# Altium footprint library CustomCase.PcbLib: 411 footprints (part 13 of 26)
Each footprint in its own frame and in the unit in brackets; x right, y up, seen from the top. Pads: shape width x height; smd on the part's side, far side on the other; paste and mask are expansions set on the pad; w line width, h text height; cw(c..) or ccw(c..) is an arc to the next point about the centre after c.
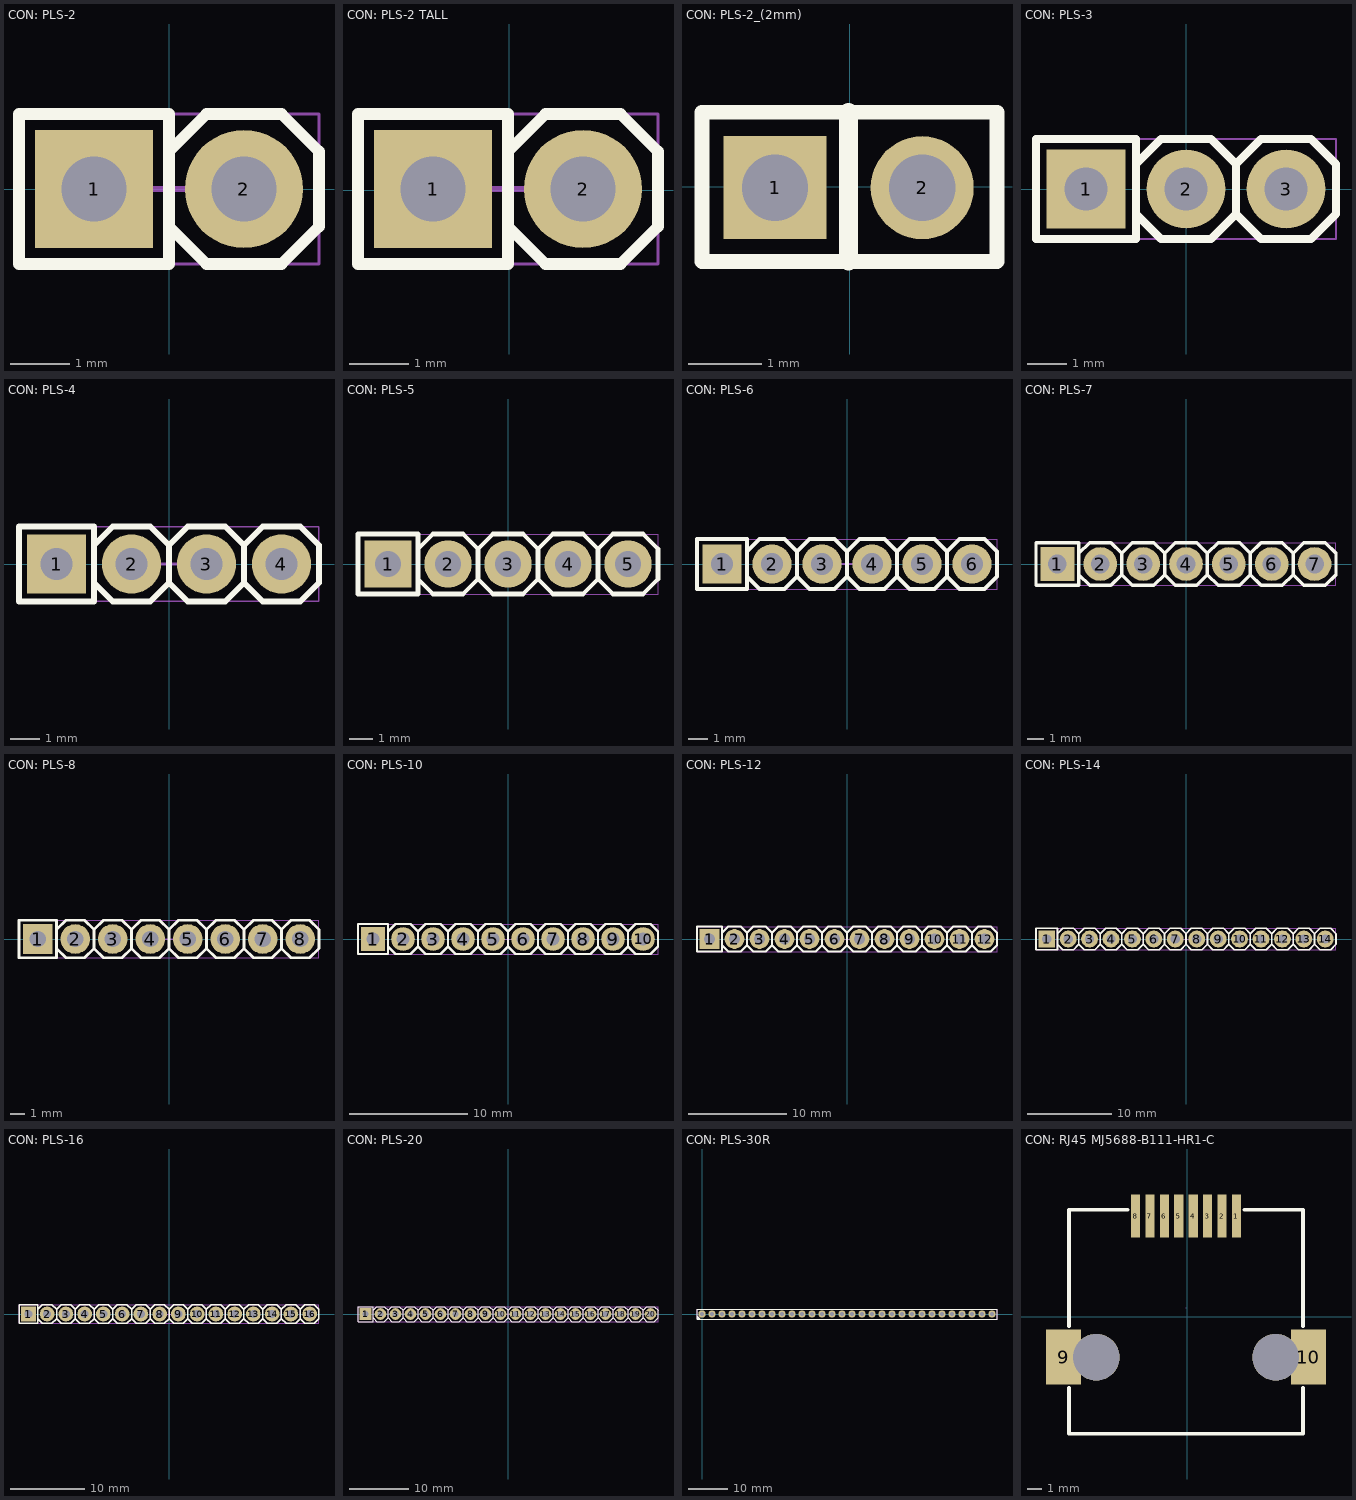
[diagram p12: the footprints below, top view; thin cyan lines are the x and y axes]

## CON: PLS-2 [mm]
height 10
pads (2):
  rect 2x2 hole 1.1: 1(-1.27,0)
  round 2 hole 1.1: 2(1.27,0)
Top Overlay:
  lines w0.2: 0,-0.635 0.635,-1.27 1.905,-1.27 2.54,-0.635 2.54,0.635 1.905,1.27 0.635,1.27 0,0.635 ; -2.54,-1.27 -2.54,1.27 0,1.27 0,-1.27 -2.54,-1.27
Top Assy:
  lines w0.1: 0,-0.635 0.635,-1.27 1.905,-1.27 2.54,-0.635 2.54,0.635 1.905,1.27 0.635,1.27 0,0.635 ; -2.54,-1.27 0,-1.27 0,1.27 -2.54,1.27 -2.54,-1.27
Size Area:
  lines w0.05: -2.54,-1.27 2.54,-1.27 2.54,1.27 -2.54,1.27 -2.54,-1.27
  lines w0.1: -0.5,0 0.5,0 ; 0,-0.5 0,0.5
3D body "PLS-2.STEP": height 8.54, standoff -3, extent -2.573,-1.284 2.507,1.256

## CON: PLS-2 TALL [mm]
pads (2):
  rect 2x2 hole 1.1: 1(-1.295,0.025)
  round 2 hole 1.1: 2(1.245,0.025)
Top Overlay:
  lines w0.2: -0.025,-0.61 0.61,-1.245 1.88,-1.245 2.515,-0.61 2.515,0.66 1.88,1.295 0.61,1.295 -0.025,0.66 ; -2.565,-1.245 -0.025,-1.245 -0.025,1.295 -2.565,1.295 -2.565,-1.245
Top Assy:
  lines w0.1: -0.025,-0.61 0.61,-1.245 1.88,-1.245 2.515,-0.61 2.515,0.66 1.88,1.295 0.61,1.295 -0.025,0.66 ; -2.565,-1.245 -2.565,1.295 -0.025,1.295 -0.025,-1.245 -2.565,-1.245
Size Area:
  lines w0.05: -2.565,-1.245 -2.565,1.295 2.515,1.295 2.515,-1.245 -2.565,-1.245
  lines w0.1: -0.525,0.025 0.475,0.025 ; -0.025,-0.475 -0.025,0.525
3D body "PLS2_TALL.stp": height 16.6, standoff -2.8, extent -2.58,-1.245 2.5,1.295

## CON: PLS-2_(2mm) [mm]
pads (2):
  rect 1.4x1.4 hole 0.9 paste-2539.97 mask+0.051: 1(-1.014,-0.015)
  round 1.4 hole 0.9 paste-2539.97 mask+0.051: 2(0.986,-0.015)
Top Overlay:
  lines w0.203: -2.004,-1.015 -2.004,1.011 2.002,1.011 2.002,-1.015 -2.004,-1.015
  lines w0.254: -0.016,-1.015 -0.016,1.011
Size Area:
  region: -1.264,0.235 -0.764,0.235 -0.764,-0.265 -1.264,-0.265
  region: 0.736,0.235 1.236,0.235 1.236,-0.265 0.736,-0.265
  region: -1.954,-1.015 -1.954,-0.99 -1.989,-0.955 -2.039,-0.955 -2.074,-0.99 -2.074,-1.015 -2.074,-1.039 -2.039,-1.075 -1.989,-1.075 -1.954,-1.039
  lines w0.051: -2.014,-1.015 1.986,-1.015 1.986,0.985 -2.014,0.985 -2.014,-1.015
3D body "1982835.stp": height 5.51, standoff -2.69, extent -2.016,-1.015 1.984,0.967
3D body: height 8, standoff -3, extent 2.725,-0.015 2.725,-0.015

## CON: PLS-3 [mm]
height 10
pads (3):
  rect 2x2 hole 1.1: 1(-2.54,0)
  round 2 hole 1.1: 2(0,0) 3(2.54,0)
Top Overlay:
  lines w0.2: -1.27,-0.635 -0.635,-1.27 0.635,-1.27 1.27,-0.635 ; -1.27,0.635 -0.635,1.27 0.635,1.27 1.27,0.635 ; 1.27,-0.635 1.905,-1.27 3.175,-1.27 3.81,-0.635 3.81,0.635 3.175,1.27 1.905,1.27 1.27,0.635 ; 1.27,-0.635 1.27,0.635 ; -3.81,-1.27 -1.27,-1.27 -1.27,1.27 -3.81,1.27 -3.81,-1.27
Top Assy:
  lines w0.1: -1.27,-0.635 -0.635,-1.27 0.635,-1.27 1.27,-0.635 ; -1.27,0.635 -0.635,1.27 0.635,1.27 1.27,0.635 ; 1.27,-0.635 1.27,0.635 ; 1.27,-0.635 1.905,-1.27 3.175,-1.27 3.81,-0.635 3.81,0.635 3.175,1.27 1.905,1.27 1.27,0.635 ; -3.81,-1.27 -3.81,1.27 -1.27,1.27 -1.27,-1.27 -3.81,-1.27
Size Area:
  lines w0.05: -3.81,-1.27 -3.81,1.27 3.81,1.27 3.81,-1.27 -3.81,-1.27
  lines w0.1: -0.5,0 0.5,0 ; 0,-0.5 0,0.5
3D body "PLS-3.STEP": height 8.54, standoff -3, extent -3.81,-1.27 3.81,1.27

## CON: PLS-4 [mm] "PLS-40 4 pin header"
height 10
pads (4):
  rect 2x2 hole 1.1: 1(-3.81,0)
  round 2 hole 1.1: 2(-1.27,0) 3(1.27,0) 4(3.81,0)
Top Overlay:
  lines w0.2: -2.54,-0.635 -1.905,-1.27 -0.635,-1.27 0,-0.635 ; -2.54,0.635 -1.905,1.27 -0.635,1.27 0,0.635 ; 0,-0.635 0,0.635 ; 0,-0.635 0.635,-1.27 1.905,-1.27 2.54,-0.635 ; 0,0.635 0.635,1.27 1.905,1.27 2.54,0.635 ; 2.54,-0.635 2.54,0.635 ; 2.54,-0.635 3.175,-1.27 4.445,-1.27 5.08,-0.635 5.08,0.635 4.445,1.27 3.175,1.27 2.54,0.635 ; -5.08,-1.27 -5.08,1.27 -2.54,1.27 -2.54,-1.27 -5.08,-1.27
Top Assy:
  lines w0.1: -2.54,-0.635 -1.905,-1.27 -0.635,-1.27 0,-0.635 ; -2.54,0.635 -1.905,1.27 -0.635,1.27 0,0.635 ; 0,-0.635 0.635,-1.27 1.905,-1.27 2.54,-0.635 ; 0,-0.635 0,0.635 ; 0,0.635 0.635,1.27 1.905,1.27 2.54,0.635 ; 2.54,-0.635 3.175,-1.27 4.445,-1.27 5.08,-0.635 5.08,0.635 4.445,1.27 3.175,1.27 2.54,0.635 ; 2.54,-0.635 2.54,0.635 ; -5.08,-1.27 -2.54,-1.27 -2.54,1.27 -5.08,1.27 -5.08,-1.27
Size Area:
  lines w0.05: -5.08,-1.27 5.08,-1.27 5.08,1.27 -5.08,1.27 -5.08,-1.27
  lines w0.1: -0.5,0 0.5,0 ; 0,-0.5 0,0.5
3D body "PLS-4.STEP": height 8.54, standoff -3, extent -5.08,-1.27 5.08,1.27

## CON: PLS-5 [mm]
height 10
pads (5):
  rect 2x2 hole 1.1: 1(-5.08,0)
  round 2 hole 1.1: 2(-2.54,0) 3(0,0) 4(2.54,0) 5(5.08,0)
Top Overlay:
  lines w0.2: -3.81,-0.635 -3.175,-1.27 -1.905,-1.27 -1.27,-0.635 ; -3.81,0.635 -3.175,1.27 -1.905,1.27 -1.27,0.635 ; -1.27,-0.635 -1.27,0.635 ; -1.27,-0.635 -0.635,-1.27 0.635,-1.27 1.27,-0.635 ; -1.27,0.635 -0.635,1.27 0.635,1.27 1.27,0.635 ; 1.27,-0.635 1.27,0.635 ; 1.27,-0.635 1.905,-1.27 3.175,-1.27 3.81,-0.635 ; 1.27,0.635 1.905,1.27 3.175,1.27 3.81,0.635 ; 3.81,-0.635 3.81,0.635 ; 3.81,-0.635 4.445,-1.27 5.715,-1.27 6.35,-0.635 6.35,0.635 5.715,1.27 4.445,1.27 3.81,0.635 ; -6.35,-1.27 -6.35,1.27 -3.81,1.27 -3.81,-1.27 -6.35,-1.27
Top Assy:
  lines w0.1: -3.81,-0.635 -3.175,-1.27 -1.905,-1.27 -1.27,-0.635 ; -3.81,0.635 -3.175,1.27 -1.905,1.27 -1.27,0.635 ; -1.27,-0.635 -0.635,-1.27 0.635,-1.27 1.27,-0.635 ; -1.27,-0.635 -1.27,0.635 ; -1.27,0.635 -0.635,1.27 0.635,1.27 1.27,0.635 ; 1.27,-0.635 1.905,-1.27 3.175,-1.27 3.81,-0.635 ; 1.27,-0.635 1.27,0.635 ; 1.27,0.635 1.905,1.27 3.175,1.27 3.81,0.635 ; 3.81,-0.635 4.445,-1.27 5.715,-1.27 6.35,-0.635 6.35,0.635 5.715,1.27 4.445,1.27 3.81,0.635 ; 3.81,-0.635 3.81,0.635 ; -6.35,-1.27 -3.81,-1.27 -3.81,1.27 -6.35,1.27 -6.35,-1.27
Size Area:
  lines w0.05: -6.35,-1.27 6.35,-1.27 6.35,1.27 -6.35,1.27 -6.35,-1.27
  lines w0.1: -0.5,0 0.5,0 ; 0,-0.5 0,0.5
3D body "PLS-5.STEP": height 8.54, standoff -3, extent -6.35,-1.27 6.35,1.27

## CON: PLS-6 [mm]
height 10
pads (6):
  rect 2x2 hole 1.1: 1(-6.35,0)
  round 2 hole 1.1: 2(-3.81,0) 3(-1.27,0) 4(1.27,0) 5(3.81,0) 6(6.35,0)
Top Overlay:
  lines w0.2: -5.08,-0.635 -4.445,-1.27 -3.175,-1.27 -2.54,-0.635 ; -5.08,0.635 -4.445,1.27 -3.175,1.27 -2.54,0.635 ; -2.54,-0.635 -1.905,-1.27 -0.635,-1.27 0,-0.635 ; -2.54,-0.635 -2.54,0.635 ; -2.54,0.635 -1.905,1.27 -0.635,1.27 0,0.635 ; 0,-0.635 0.635,-1.27 1.905,-1.27 2.54,-0.635 ; 0,-0.635 0,0.635 ; 0,0.635 0.635,1.27 1.905,1.27 2.54,0.635 ; 2.54,-0.635 3.175,-1.27 4.445,-1.27 5.08,-0.635 ; 2.54,-0.635 2.54,0.635 ; 2.54,0.635 3.175,1.27 4.445,1.27 5.08,0.635 ; 5.08,-0.635 5.08,0.635 ; 5.08,-0.635 5.715,-1.27 6.985,-1.27 7.62,-0.635 7.62,0.635 6.985,1.27 5.715,1.27 5.08,0.635 ; -7.62,-1.27 -5.08,-1.27 -5.08,1.27 -7.62,1.27 -7.62,-1.27
Top Assy:
  lines w0.1: -5.08,-0.635 -4.445,-1.27 -3.175,-1.27 -2.54,-0.635 ; -5.08,0.635 -4.445,1.27 -3.175,1.27 -2.54,0.635 ; -2.54,-0.635 -2.54,0.635 ; -2.54,-0.635 -1.905,-1.27 -0.635,-1.27 0,-0.635 ; -2.54,0.635 -1.905,1.27 -0.635,1.27 0,0.635 ; 0,-0.635 0,0.635 ; 0,-0.635 0.635,-1.27 1.905,-1.27 2.54,-0.635 ; 0,0.635 0.635,1.27 1.905,1.27 2.54,0.635 ; 2.54,-0.635 2.54,0.635 ; 2.54,-0.635 3.175,-1.27 4.445,-1.27 5.08,-0.635 ; 2.54,0.635 3.175,1.27 4.445,1.27 5.08,0.635 ; 5.08,-0.635 5.715,-1.27 6.985,-1.27 7.62,-0.635 7.62,0.635 6.985,1.27 5.715,1.27 5.08,0.635 ; 5.08,-0.635 5.08,0.635 ; -7.62,-1.27 -7.62,1.27 -5.08,1.27 -5.08,-1.27 -7.62,-1.27
Size Area:
  lines w0.05: -7.62,-1.27 -7.62,1.27 7.62,1.27 7.62,-1.27 -7.62,-1.27
  lines w0.1: -0.5,0 0.5,0 ; 0,-0.5 0,0.5
3D body "PLS-6.STEP": height 8.54, standoff -3, extent -7.62,-1.27 7.62,1.27

## CON: PLS-7 [mm]
height 10
pads (7):
  rect 2x2 hole 1.1: 1(-7.62,0)
  round 2 hole 1.1: 2(-5.08,0) 3(-2.54,0) 4(0,0) 5(2.54,0) 6(5.08,0) 7(7.62,0)
Top Overlay:
  lines w0.2: -6.35,-0.635 -5.715,-1.27 -4.445,-1.27 -3.81,-0.635 ; -6.35,0.635 -5.715,1.27 -4.445,1.27 -3.81,0.635 ; -3.81,-0.635 -3.175,-1.27 -1.905,-1.27 -1.27,-0.635 ; -3.81,-0.635 -3.81,0.635 ; -3.81,0.635 -3.175,1.27 -1.905,1.27 -1.27,0.635 ; -1.27,-0.635 -0.635,-1.27 0.635,-1.27 1.27,-0.635 ; -1.27,-0.635 -1.27,0.635 ; -1.27,0.635 -0.635,1.27 0.635,1.27 1.27,0.635 ; 1.27,-0.635 1.905,-1.27 3.175,-1.27 3.81,-0.635 ; 1.27,-0.635 1.27,0.635 ; 1.27,0.635 1.905,1.27 3.175,1.27 3.81,0.635 ; 3.81,-0.635 3.81,0.635 ; 3.81,-0.635 4.445,-1.27 5.715,-1.27 6.35,-0.635 ; 3.81,0.635 4.445,1.27 5.715,1.27 6.35,0.635 ; 6.35,-0.635 6.985,-1.27 8.255,-1.27 8.89,-0.635 8.89,0.635 8.255,1.27 6.985,1.27 6.35,0.635 ; 6.35,-0.635 6.35,0.635 ; -8.89,-1.27 -6.35,-1.27 -6.35,1.27 -8.89,1.27 -8.89,-1.27
Top Assy:
  lines w0.1: -6.35,-0.635 -5.715,-1.27 -4.445,-1.27 -3.81,-0.635 ; -6.35,0.635 -5.715,1.27 -4.445,1.27 -3.81,0.635 ; -3.81,-0.635 -3.81,0.635 ; -3.81,-0.635 -3.175,-1.27 -1.905,-1.27 -1.27,-0.635 ; -3.81,0.635 -3.175,1.27 -1.905,1.27 -1.27,0.635 ; -1.27,-0.635 -1.27,0.635 ; -1.27,-0.635 -0.635,-1.27 0.635,-1.27 1.27,-0.635 ; -1.27,0.635 -0.635,1.27 0.635,1.27 1.27,0.635 ; 1.27,-0.635 1.27,0.635 ; 1.27,-0.635 1.905,-1.27 3.175,-1.27 3.81,-0.635 ; 1.27,0.635 1.905,1.27 3.175,1.27 3.81,0.635 ; 3.81,-0.635 4.445,-1.27 5.715,-1.27 6.35,-0.635 ; 3.81,-0.635 3.81,0.635 ; 3.81,0.635 4.445,1.27 5.715,1.27 6.35,0.635 ; 6.35,-0.635 6.35,0.635 ; 6.35,-0.635 6.985,-1.27 8.255,-1.27 8.89,-0.635 8.89,0.635 8.255,1.27 6.985,1.27 6.35,0.635 ; -8.89,-1.27 -8.89,1.27 -6.35,1.27 -6.35,-1.27 -8.89,-1.27
Size Area:
  lines w0.05: -8.89,-1.27 -8.89,1.27 8.89,1.27 8.89,-1.27 -8.89,-1.27
  lines w0.1: -0.5,0 0.5,0 ; 0,-0.5 0,0.5

## CON: PLS-8 [mm] "PLS-40 8 pin header"
height 10
pads (8):
  rect 2x2 hole 1.1: 1(-8.89,0)
  round 2 hole 1.1: 2(-6.35,0) 3(-3.81,0) 4(-1.27,0) 5(1.27,0) 6(3.81,0) 7(6.35,0) 8(8.89,0)
Top Overlay:
  lines w0.2: -7.62,-0.635 -6.985,-1.27 -5.715,-1.27 -5.08,-0.635 ; -7.62,0.635 -6.985,1.27 -5.715,1.27 -5.08,0.635 ; -5.08,-0.635 -5.08,0.635 ; -5.08,-0.635 -4.445,-1.27 -3.175,-1.27 -2.54,-0.635 ; -5.08,0.635 -4.445,1.27 -3.175,1.27 -2.54,0.635 ; -2.54,-0.635 -2.54,0.635 ; -2.54,-0.635 -1.905,-1.27 -0.635,-1.27 0,-0.635 ; -2.54,0.635 -1.905,1.27 -0.635,1.27 0,0.635 ; 0,-0.635 0,0.635 ; 0,-0.635 0.635,-1.27 1.905,-1.27 2.54,-0.635 ; 0,0.635 0.635,1.27 1.905,1.27 2.54,0.635 ; 2.54,-0.635 3.175,-1.27 4.445,-1.27 5.08,-0.635 ; 2.54,-0.635 2.54,0.635 ; 2.54,0.635 3.175,1.27 4.445,1.27 5.08,0.635 ; 5.08,-0.635 5.08,0.635 ; 5.08,-0.635 5.715,-1.27 6.985,-1.27 7.62,-0.635 ; 5.08,0.635 5.715,1.27 6.985,1.27 7.62,0.635 ; 7.62,-0.635 8.255,-1.27 9.525,-1.27 10.16,-0.635 10.16,0.635 9.525,1.27 8.255,1.27 7.62,0.635 ; 7.62,-0.635 7.62,0.635 ; -10.16,-1.27 -10.16,1.27 -7.62,1.27 -7.62,-1.27 -10.16,-1.27
Top Assy:
  lines w0.1: -7.62,-0.635 -6.985,-1.27 -5.715,-1.27 -5.08,-0.635 ; -7.62,0.635 -6.985,1.27 -5.715,1.27 -5.08,0.635 ; -5.08,-0.635 -4.445,-1.27 -3.175,-1.27 -2.54,-0.635 ; -5.08,-0.635 -5.08,0.635 ; -5.08,0.635 -4.445,1.27 -3.175,1.27 -2.54,0.635 ; -2.54,-0.635 -1.905,-1.27 -0.635,-1.27 0,-0.635 ; -2.54,-0.635 -2.54,0.635 ; -2.54,0.635 -1.905,1.27 -0.635,1.27 0,0.635 ; 0,-0.635 0.635,-1.27 1.905,-1.27 2.54,-0.635 ; 0,-0.635 0,0.635 ; 0,0.635 0.635,1.27 1.905,1.27 2.54,0.635 ; 2.54,-0.635 2.54,0.635 ; 2.54,-0.635 3.175,-1.27 4.445,-1.27 5.08,-0.635 ; 2.54,0.635 3.175,1.27 4.445,1.27 5.08,0.635 ; 5.08,-0.635 5.715,-1.27 6.985,-1.27 7.62,-0.635 ; 5.08,-0.635 5.08,0.635 ; 5.08,0.635 5.715,1.27 6.985,1.27 7.62,0.635 ; 7.62,-0.635 7.62,0.635 ; 7.62,-0.635 8.255,-1.27 9.525,-1.27 10.16,-0.635 10.16,0.635 9.525,1.27 8.255,1.27 7.62,0.635 ; -10.16,-1.27 -7.62,-1.27 -7.62,1.27 -10.16,1.27 -10.16,-1.27
Size Area:
  lines w0.05: -10.16,-1.27 10.16,-1.27 10.16,1.27 -10.16,1.27 -10.16,-1.27
  lines w0.1: -0.5,0 0.5,0 ; 0,-0.5 0,0.5
3D body "PLS-8.STEP": height 8.54, standoff -3, extent -10.16,-1.27 10.16,1.27

## CON: PLS-10 [mm] "PLS-40 10 pin header"
height 10
pads (10):
  rect 2x2 hole 1.1: 1(-11.43,0)
  round 2 hole 1.1: 2(-8.89,0) 3(-6.35,0) 4(-3.81,0) 5(-1.27,0) 6(1.27,0) 7(3.81,0) 8(6.35,0) 9(8.89,0) 10(11.43,0)
Top Overlay:
  lines w0.2: -10.16,-0.635 -9.525,-1.27 -8.255,-1.27 -7.62,-0.635 ; -10.16,0.635 -9.525,1.27 -8.255,1.27 -7.62,0.635 ; -7.62,-0.635 -6.985,-1.27 -5.715,-1.27 -5.08,-0.635 ; -7.62,-0.635 -7.62,0.635 ; -7.62,0.635 -6.985,1.27 -5.715,1.27 -5.08,0.635 ; -5.08,-0.635 -4.445,-1.27 -3.175,-1.27 -2.54,-0.635 ; -5.08,-0.635 -5.08,0.635 ; -5.08,0.635 -4.445,1.27 -3.175,1.27 -2.54,0.635 ; -2.54,-0.635 -1.905,-1.27 -0.635,-1.27 0,-0.635 ; -2.54,-0.635 -2.54,0.635 ; -2.54,0.635 -1.905,1.27 -0.635,1.27 0,0.635 ; 0,-0.635 0,0.635 ; 0,-0.635 0.635,-1.27 1.905,-1.27 2.54,-0.635 ; 0,0.635 0.635,1.27 1.905,1.27 2.54,0.635 ; 2.54,-0.635 3.175,-1.27 4.445,-1.27 5.08,-0.635 ; 2.54,-0.635 2.54,0.635 ; 2.54,0.635 3.175,1.27 4.445,1.27 5.08,0.635 ; 5.08,-0.635 5.08,0.635 ; 5.08,-0.635 5.715,-1.27 6.985,-1.27 7.62,-0.635 ; 5.08,0.635 5.715,1.27 6.985,1.27 7.62,0.635 ; 7.62,-0.635 7.62,0.635 ; 7.62,-0.635 8.255,-1.27 9.525,-1.27 10.16,-0.635 ; 7.62,0.635 8.255,1.27 9.525,1.27 10.16,0.635 ; 10.16,-0.635 10.16,0.635 ; 10.16,-0.635 10.795,-1.27 12.065,-1.27 12.7,-0.635 12.7,0.635 12.065,1.27 10.795,1.27 10.16,0.635 ; -12.7,-1.27 -10.16,-1.27 -10.16,1.27 -12.7,1.27 -12.7,-1.27
Top Assy:
  lines w0.1: -10.16,-0.635 -9.525,-1.27 -8.255,-1.27 -7.62,-0.635 ; -10.16,0.635 -9.525,1.27 -8.255,1.27 -7.62,0.635 ; -7.62,-0.635 -7.62,0.635 ; -7.62,-0.635 -6.985,-1.27 -5.715,-1.27 -5.08,-0.635 ; -7.62,0.635 -6.985,1.27 -5.715,1.27 -5.08,0.635 ; -5.08,-0.635 -5.08,0.635 ; -5.08,-0.635 -4.445,-1.27 -3.175,-1.27 -2.54,-0.635 ; -5.08,0.635 -4.445,1.27 -3.175,1.27 -2.54,0.635 ; -2.54,-0.635 -2.54,0.635 ; -2.54,-0.635 -1.905,-1.27 -0.635,-1.27 0,-0.635 ; -2.54,0.635 -1.905,1.27 -0.635,1.27 0,0.635 ; 0,-0.635 0.635,-1.27 1.905,-1.27 2.54,-0.635 ; 0,-0.635 0,0.635 ; 0,0.635 0.635,1.27 1.905,1.27 2.54,0.635 ; 2.54,-0.635 2.54,0.635 ; 2.54,-0.635 3.175,-1.27 4.445,-1.27 5.08,-0.635 ; 2.54,0.635 3.175,1.27 4.445,1.27 5.08,0.635 ; 5.08,-0.635 5.715,-1.27 6.985,-1.27 7.62,-0.635 ; 5.08,-0.635 5.08,0.635 ; 5.08,0.635 5.715,1.27 6.985,1.27 7.62,0.635 ; 7.62,-0.635 8.255,-1.27 9.525,-1.27 10.16,-0.635 ; 7.62,-0.635 7.62,0.635 ; 7.62,0.635 8.255,1.27 9.525,1.27 10.16,0.635 ; 10.16,-0.635 10.795,-1.27 12.065,-1.27 12.7,-0.635 12.7,0.635 12.065,1.27 10.795,1.27 10.16,0.635 ; 10.16,-0.635 10.16,0.635 ; -12.7,-1.27 -12.7,1.27 -10.16,1.27 -10.16,-1.27 -12.7,-1.27
Size Area:
  lines w0.05: -12.7,-1.27 -12.7,1.27 12.7,1.27 12.7,-1.27 -12.7,-1.27
  lines w0.1: -0.5,0 0.5,0 ; 0,-0.5 0,0.5
3D body "pls-10c.STEP": height 8.54, standoff -3, extent -12.7,-1.27 12.7,1.27
3D body "PLS-10.STEP": height 8.54, standoff -3, extent -12.7,-1.27 12.7,1.27

## CON: PLS-12 [mm] "PLS-40 12 pin header"
height 10
pads (12):
  rect 2x2 hole 1.1: 1(-13.97,0)
  round 2 hole 1.1: 2(-11.43,0) 3(-8.89,0) 4(-6.35,0) 5(-3.81,0) 6(-1.27,0) 7(1.27,0) 8(3.81,0) 9(6.35,0) 10(8.89,0) 11(11.43,0) 12(13.97,0)
Top Overlay:
  lines w0.2: -12.7,-0.635 -12.065,-1.27 -10.795,-1.27 -10.16,-0.635 ; -12.7,0.635 -12.065,1.27 -10.795,1.27 -10.16,0.635 ; -10.16,-0.635 -9.525,-1.27 -8.255,-1.27 -7.62,-0.635 ; -10.16,-0.635 -10.16,0.635 ; -10.16,0.635 -9.525,1.27 -8.255,1.27 -7.62,0.635 ; -7.62,-0.635 -6.985,-1.27 -5.715,-1.27 -5.08,-0.635 ; -7.62,-0.635 -7.62,0.635 ; -7.62,0.635 -6.985,1.27 -5.715,1.27 -5.08,0.635 ; -5.08,-0.635 -4.445,-1.27 -3.175,-1.27 -2.54,-0.635 ; -5.08,-0.635 -5.08,0.635 ; -5.08,0.635 -4.445,1.27 -3.175,1.27 -2.54,0.635 ; -2.54,-0.635 -2.54,0.635 ; -2.54,-0.635 -1.905,-1.27 -0.635,-1.27 0,-0.635 ; -2.54,0.635 -1.905,1.27 -0.635,1.27 0,0.635 ; 0,-0.635 0.635,-1.27 1.905,-1.27 2.54,-0.635 ; 0,-0.635 0,0.635 ; 0,0.635 0.635,1.27 1.905,1.27 2.54,0.635 ; 2.54,-0.635 2.54,0.635 ; 2.54,-0.635 3.175,-1.27 4.445,-1.27 5.08,-0.635 ; 2.54,0.635 3.175,1.27 4.445,1.27 5.08,0.635 ; 5.08,-0.635 5.08,0.635 ; 5.08,-0.635 5.715,-1.27 6.985,-1.27 7.62,-0.635 ; 5.08,0.635 5.715,1.27 6.985,1.27 7.62,0.635 ; 7.62,-0.635 7.62,0.635 ; 7.62,-0.635 8.255,-1.27 9.525,-1.27 10.16,-0.635 ; 7.62,0.635 8.255,1.27 9.525,1.27 10.16,0.635 ; 10.16,-0.635 10.795,-1.27 12.065,-1.27 12.7,-0.635 ; 10.16,-0.635 10.16,0.635 ; 10.16,0.635 10.795,1.27 12.065,1.27 12.7,0.635 ; 12.7,-0.635 12.7,0.635 ; 12.7,-0.635 13.335,-1.27 14.605,-1.27 15.24,-0.635 15.24,0.635 14.605,1.27 13.335,1.27 12.7,0.635 ; -15.24,-1.27 -12.7,-1.27 -12.7,1.27 -15.24,1.27 -15.24,-1.27
Top Assy:
  lines w0.1: -12.7,-0.635 -12.065,-1.27 -10.795,-1.27 -10.16,-0.635 ; -12.7,0.635 -12.065,1.27 -10.795,1.27 -10.16,0.635 ; -10.16,-0.635 -10.16,0.635 ; -10.16,-0.635 -9.525,-1.27 -8.255,-1.27 -7.62,-0.635 ; -10.16,0.635 -9.525,1.27 -8.255,1.27 -7.62,0.635 ; -7.62,-0.635 -7.62,0.635 ; -7.62,-0.635 -6.985,-1.27 -5.715,-1.27 -5.08,-0.635 ; -7.62,0.635 -6.985,1.27 -5.715,1.27 -5.08,0.635 ; -5.08,-0.635 -5.08,0.635 ; -5.08,-0.635 -4.445,-1.27 -3.175,-1.27 -2.54,-0.635 ; -5.08,0.635 -4.445,1.27 -3.175,1.27 -2.54,0.635 ; -2.54,-0.635 -1.905,-1.27 -0.635,-1.27 0,-0.635 ; -2.54,-0.635 -2.54,0.635 ; -2.54,0.635 -1.905,1.27 -0.635,1.27 0,0.635 ; 0,-0.635 0,0.635 ; 0,-0.635 0.635,-1.27 1.905,-1.27 2.54,-0.635 ; 0,0.635 0.635,1.27 1.905,1.27 2.54,0.635 ; 2.54,-0.635 3.175,-1.27 4.445,-1.27 5.08,-0.635 ; 2.54,-0.635 2.54,0.635 ; 2.54,0.635 3.175,1.27 4.445,1.27 5.08,0.635 ; 5.08,-0.635 5.715,-1.27 6.985,-1.27 7.62,-0.635 ; 5.08,-0.635 5.08,0.635 ; 5.08,0.635 5.715,1.27 6.985,1.27 7.62,0.635 ; 7.62,-0.635 8.255,-1.27 9.525,-1.27 10.16,-0.635 ; 7.62,-0.635 7.62,0.635 ; 7.62,0.635 8.255,1.27 9.525,1.27 10.16,0.635 ; 10.16,-0.635 10.16,0.635 ; 10.16,-0.635 10.795,-1.27 12.065,-1.27 12.7,-0.635 ; 10.16,0.635 10.795,1.27 12.065,1.27 12.7,0.635 ; 12.7,-0.635 12.7,0.635 ; 12.7,-0.635 13.335,-1.27 14.605,-1.27 15.24,-0.635 15.24,0.635 14.605,1.27 13.335,1.27 12.7,0.635 ; -15.24,-1.27 -15.24,1.27 -12.7,1.27 -12.7,-1.27 -15.24,-1.27
Size Area:
  lines w0.05: -15.24,-1.27 -15.24,1.27 15.24,1.27 15.24,-1.27 -15.24,-1.27
  lines w0.1: -0.5,0 0.5,0 ; 0,-0.5 0,0.5
3D body "PLS-12.STEP": height 8.54, standoff -3, extent -15.24,-1.27 15.24,1.27

## CON: PLS-14 [mm]
height 10
pads (14):
  rect 2x2 hole 1.1: 1(-16.51,0)
  round 2 hole 1.1: 2(-13.97,0) 3(-11.43,0) 4(-8.89,0) 5(-6.35,0) 6(-3.81,0) 7(-1.27,0) 8(1.27,0) 9(3.81,0) 10(6.35,0) 11(8.89,0) 12(11.43,0) 13(13.97,0) 14(16.51,0)
Top Overlay:
  lines w0.2: -15.24,-0.635 -14.605,-1.27 -13.335,-1.27 -12.7,-0.635 ; -15.24,0.635 -14.605,1.27 -13.335,1.27 -12.7,0.635 ; -12.7,-0.635 -12.065,-1.27 -10.795,-1.27 -10.16,-0.635 ; -12.7,-0.635 -12.7,0.635 ; -12.7,0.635 -12.065,1.27 -10.795,1.27 -10.16,0.635 ; -10.16,-0.635 -9.525,-1.27 -8.255,-1.27 -7.62,-0.635 ; -10.16,-0.635 -10.16,0.635 ; -10.16,0.635 -9.525,1.27 -8.255,1.27 -7.62,0.635 ; -7.62,-0.635 -6.985,-1.27 -5.715,-1.27 -5.08,-0.635 ; -7.62,-0.635 -7.62,0.635 ; -7.62,0.635 -6.985,1.27 -5.715,1.27 -5.08,0.635 ; -5.08,-0.635 -5.08,0.635 ; -5.08,-0.635 -4.445,-1.27 -3.175,-1.27 -2.54,-0.635 ; -5.08,0.635 -4.445,1.27 -3.175,1.27 -2.54,0.635 ; -2.54,-0.635 -1.905,-1.27 -0.635,-1.27 0,-0.635 ; -2.54,-0.635 -2.54,0.635 ; -2.54,0.635 -1.905,1.27 -0.635,1.27 0,0.635 ; 0,-0.635 0,0.635 ; 0,-0.635 0.635,-1.27 1.905,-1.27 2.54,-0.635 ; 0,0.635 0.635,1.27 1.905,1.27 2.54,0.635 ; 2.54,-0.635 2.54,0.635 ; 2.54,-0.635 3.175,-1.27 4.445,-1.27 5.08,-0.635 ; 2.54,0.635 3.175,1.27 4.445,1.27 5.08,0.635 ; 5.08,-0.635 5.08,0.635 ; 5.08,-0.635 5.715,-1.27 6.985,-1.27 7.62,-0.635 ; 5.08,0.635 5.715,1.27 6.985,1.27 7.62,0.635 ; 7.62,-0.635 8.255,-1.27 9.525,-1.27 10.16,-0.635 ; 7.62,-0.635 7.62,0.635 ; 7.62,0.635 8.255,1.27 9.525,1.27 10.16,0.635 ; 10.16,-0.635 10.16,0.635 ; 10.16,-0.635 10.795,-1.27 12.065,-1.27 12.7,-0.635 ; 10.16,0.635 10.795,1.27 12.065,1.27 12.7,0.635 ; 12.7,-0.635 12.7,0.635 ; 12.7,-0.635 13.335,-1.27 14.605,-1.27 15.24,-0.635 ; 12.7,0.635 13.335,1.27 14.605,1.27 15.24,0.635 ; 15.24,-0.635 15.875,-1.27 17.145,-1.27 17.78,-0.635 17.78,0.635 17.145,1.27 15.875,1.27 15.24,0.635 ; 15.24,-0.635 15.24,0.635 ; -17.78,-1.27 -15.24,-1.27 -15.24,1.27 -17.78,1.27 -17.78,-1.27
Top Assy:
  lines w0.1: -15.24,-0.635 -14.605,-1.27 -13.335,-1.27 -12.7,-0.635 ; -15.24,0.635 -14.605,1.27 -13.335,1.27 -12.7,0.635 ; -12.7,-0.635 -12.7,0.635 ; -12.7,-0.635 -12.065,-1.27 -10.795,-1.27 -10.16,-0.635 ; -12.7,0.635 -12.065,1.27 -10.795,1.27 -10.16,0.635 ; -10.16,-0.635 -10.16,0.635 ; -10.16,-0.635 -9.525,-1.27 -8.255,-1.27 -7.62,-0.635 ; -10.16,0.635 -9.525,1.27 -8.255,1.27 -7.62,0.635 ; -7.62,-0.635 -7.62,0.635 ; -7.62,-0.635 -6.985,-1.27 -5.715,-1.27 -5.08,-0.635 ; -7.62,0.635 -6.985,1.27 -5.715,1.27 -5.08,0.635 ; -5.08,-0.635 -4.445,-1.27 -3.175,-1.27 -2.54,-0.635 ; -5.08,-0.635 -5.08,0.635 ; -5.08,0.635 -4.445,1.27 -3.175,1.27 -2.54,0.635 ; -2.54,-0.635 -2.54,0.635 ; -2.54,-0.635 -1.905,-1.27 -0.635,-1.27 0,-0.635 ; -2.54,0.635 -1.905,1.27 -0.635,1.27 0,0.635 ; 0,-0.635 0.635,-1.27 1.905,-1.27 2.54,-0.635 ; 0,-0.635 0,0.635 ; 0,0.635 0.635,1.27 1.905,1.27 2.54,0.635 ; 2.54,-0.635 3.175,-1.27 4.445,-1.27 5.08,-0.635 ; 2.54,-0.635 2.54,0.635 ; 2.54,0.635 3.175,1.27 4.445,1.27 5.08,0.635 ; 5.08,-0.635 5.715,-1.27 6.985,-1.27 7.62,-0.635 ; 5.08,-0.635 5.08,0.635 ; 5.08,0.635 5.715,1.27 6.985,1.27 7.62,0.635 ; 7.62,-0.635 7.62,0.635 ; 7.62,-0.635 8.255,-1.27 9.525,-1.27 10.16,-0.635 ; 7.62,0.635 8.255,1.27 9.525,1.27 10.16,0.635 ; 10.16,-0.635 10.16,0.635 ; 10.16,-0.635 10.795,-1.27 12.065,-1.27 12.7,-0.635 ; 10.16,0.635 10.795,1.27 12.065,1.27 12.7,0.635 ; 12.7,-0.635 13.335,-1.27 14.605,-1.27 15.24,-0.635 ; 12.7,-0.635 12.7,0.635 ; 12.7,0.635 13.335,1.27 14.605,1.27 15.24,0.635 ; 15.24,-0.635 15.875,-1.27 17.145,-1.27 17.78,-0.635 17.78,0.635 17.145,1.27 15.875,1.27 15.24,0.635 ; 15.24,-0.635 15.24,0.635 ; -17.78,-1.27 -17.78,1.27 -15.24,1.27 -15.24,-1.27 -17.78,-1.27
Size Area:
  lines w0.05: -17.78,-1.27 -17.78,1.27 17.78,1.27 17.78,-1.27 -17.78,-1.27
  lines w0.1: -0.5,0 0.5,0 ; 0,-0.5 0,0.5
3D body "PLS-14.STEP": height 8.54, standoff -3, extent -17.78,-1.27 17.78,1.27

## CON: PLS-16 [mm]
height 10
pads (16):
  rect 2x2 hole 1.1: 1(-19.05,0)
  round 2 hole 1.1: 2(-16.51,0) 3(-13.97,0) 4(-11.43,0) 5(-8.89,0) 6(-6.35,0) 7(-3.81,0) 8(-1.27,0) 9(1.27,0) 10(3.81,0) 11(6.35,0) 12(8.89,0) 13(11.43,0) 14(13.97,0) 15(16.51,0) 16(19.05,0)
Top Overlay:
  lines w0.2: -17.78,-0.635 -17.145,-1.27 -15.875,-1.27 -15.24,-0.635 ; -17.78,0.635 -17.145,1.27 -15.875,1.27 -15.24,0.635 ; -15.24,-0.635 -14.605,-1.27 -13.335,-1.27 -12.7,-0.635 ; -15.24,-0.635 -15.24,0.635 ; -15.24,0.635 -14.605,1.27 -13.335,1.27 -12.7,0.635 ; -12.7,-0.635 -12.065,-1.27 -10.795,-1.27 -10.16,-0.635 ; -12.7,-0.635 -12.7,0.635 ; -12.7,0.635 -12.065,1.27 -10.795,1.27 -10.16,0.635 ; -10.16,-0.635 -9.525,-1.27 -8.255,-1.27 -7.62,-0.635 ; -10.16,-0.635 -10.16,0.635 ; -10.16,0.635 -9.525,1.27 -8.255,1.27 -7.62,0.635 ; -7.62,-0.635 -7.62,0.635 ; -7.62,-0.635 -6.985,-1.27 -5.715,-1.27 -5.08,-0.635 ; -7.62,0.635 -6.985,1.27 -5.715,1.27 -5.08,0.635 ; -5.08,-0.635 -4.445,-1.27 -3.175,-1.27 -2.54,-0.635 ; -5.08,-0.635 -5.08,0.635 ; -5.08,0.635 -4.445,1.27 -3.175,1.27 -2.54,0.635 ; -2.54,-0.635 -2.54,0.635 ; -2.54,-0.635 -1.905,-1.27 -0.635,-1.27 0,-0.635 ; -2.54,0.635 -1.905,1.27 -0.635,1.27 0,0.635 ; 0,-0.635 0,0.635 ; 0,-0.635 0.635,-1.27 1.905,-1.27 2.54,-0.635 ; 0,0.635 0.635,1.27 1.905,1.27 2.54,0.635 ; 2.54,-0.635 2.54,0.635 ; 2.54,-0.635 3.175,-1.27 4.445,-1.27 5.08,-0.635 ; 2.54,0.635 3.175,1.27 4.445,1.27 5.08,0.635 ; 5.08,-0.635 5.715,-1.27 6.985,-1.27 7.62,-0.635 ; 5.08,-0.635 5.08,0.635 ; 5.08,0.635 5.715,1.27 6.985,1.27 7.62,0.635 ; 7.62,-0.635 7.62,0.635 ; 7.62,-0.635 8.255,-1.27 9.525,-1.27 10.16,-0.635 ; 7.62,0.635 8.255,1.27 9.525,1.27 10.16,0.635 ; 10.16,-0.635 10.16,0.635 ; 10.16,-0.635 10.795,-1.27 12.065,-1.27 12.7,-0.635 ; 10.16,0.635 10.795,1.27 12.065,1.27 12.7,0.635 ; 12.7,-0.635 13.335,-1.27 14.605,-1.27 15.24,-0.635 ; 12.7,-0.635 12.7,0.635 ; 12.7,0.635 13.335,1.27 14.605,1.27 15.24,0.635 ; 15.24,-0.635 15.24,0.635 ; 15.24,-0.635 15.875,-1.27 17.145,-1.27 17.78,-0.635 ; 15.24,0.635 15.875,1.27 17.145,1.27 17.78,0.635 ; 17.78,-0.635 18.415,-1.27 19.685,-1.27 20.32,-0.635 20.32,0.635 19.685,1.27 18.415,1.27 17.78,0.635 ; 17.78,-0.635 17.78,0.635 ; -20.32,-1.27 -17.78,-1.27 -17.78,1.27 -20.32,1.27 -20.32,-1.27
Top Assy:
  lines w0.1: -17.78,-0.635 -17.145,-1.27 -15.875,-1.27 -15.24,-0.635 ; -17.78,0.635 -17.145,1.27 -15.875,1.27 -15.24,0.635 ; -15.24,-0.635 -15.24,0.635 ; -15.24,-0.635 -14.605,-1.27 -13.335,-1.27 -12.7,-0.635 ; -15.24,0.635 -14.605,1.27 -13.335,1.27 -12.7,0.635 ; -12.7,-0.635 -12.7,0.635 ; -12.7,-0.635 -12.065,-1.27 -10.795,-1.27 -10.16,-0.635 ; -12.7,0.635 -12.065,1.27 -10.795,1.27 -10.16,0.635 ; -10.16,-0.635 -10.16,0.635 ; -10.16,-0.635 -9.525,-1.27 -8.255,-1.27 -7.62,-0.635 ; -10.16,0.635 -9.525,1.27 -8.255,1.27 -7.62,0.635 ; -7.62,-0.635 -6.985,-1.27 -5.715,-1.27 -5.08,-0.635 ; -7.62,-0.635 -7.62,0.635 ; -7.62,0.635 -6.985,1.27 -5.715,1.27 -5.08,0.635 ; -5.08,-0.635 -5.08,0.635 ; -5.08,-0.635 -4.445,-1.27 -3.175,-1.27 -2.54,-0.635 ; -5.08,0.635 -4.445,1.27 -3.175,1.27 -2.54,0.635 ; -2.54,-0.635 -1.905,-1.27 -0.635,-1.27 0,-0.635 ; -2.54,-0.635 -2.54,0.635 ; -2.54,0.635 -1.905,1.27 -0.635,1.27 0,0.635 ; 0,-0.635 0.635,-1.27 1.905,-1.27 2.54,-0.635 ; 0,-0.635 0,0.635 ; 0,0.635 0.635,1.27 1.905,1.27 2.54,0.635 ; 2.54,-0.635 3.175,-1.27 4.445,-1.27 5.08,-0.635 ; 2.54,-0.635 2.54,0.635 ; 2.54,0.635 3.175,1.27 4.445,1.27 5.08,0.635 ; 5.08,-0.635 5.08,0.635 ; 5.08,-0.635 5.715,-1.27 6.985,-1.27 7.62,-0.635 ; 5.08,0.635 5.715,1.27 6.985,1.27 7.62,0.635 ; 7.62,-0.635 7.62,0.635 ; 7.62,-0.635 8.255,-1.27 9.525,-1.27 10.16,-0.635 ; 7.62,0.635 8.255,1.27 9.525,1.27 10.16,0.635 ; 10.16,-0.635 10.795,-1.27 12.065,-1.27 12.7,-0.635 ; 10.16,-0.635 10.16,0.635 ; 10.16,0.635 10.795,1.27 12.065,1.27 12.7,0.635 ; 12.7,-0.635 13.335,-1.27 14.605,-1.27 15.24,-0.635 ; 12.7,-0.635 12.7,0.635 ; 12.7,0.635 13.335,1.27 14.605,1.27 15.24,0.635 ; 15.24,-0.635 15.875,-1.27 17.145,-1.27 17.78,-0.635 ; 15.24,-0.635 15.24,0.635 ; 15.24,0.635 15.875,1.27 17.145,1.27 17.78,0.635 ; 17.78,-0.635 18.415,-1.27 19.685,-1.27 20.32,-0.635 20.32,0.635 19.685,1.27 18.415,1.27 17.78,0.635 ; 17.78,-0.635 17.78,0.635 ; -20.32,-1.27 -20.32,1.27 -17.78,1.27 -17.78,-1.27 -20.32,-1.27
Size Area:
  lines w0.05: -20.32,-1.27 -20.32,1.27 20.32,1.27 20.32,-1.27 -20.32,-1.27
  lines w0.1: -0.5,0 0.5,0 ; 0,-0.5 0,0.5
3D body "PLS-16.STEP": height 8.54, standoff -3, extent -20.32,-1.27 20.32,1.27

## CON: PLS-20 [mm]
height 10
pads (20):
  rect 2x2 hole 1.1: 1(-24.13,0)
  round 2 hole 1.1: 2(-21.59,0) 3(-19.05,0) 4(-16.51,0) 5(-13.97,0) 6(-11.43,0) 7(-8.89,0) 8(-6.35,0) 9(-3.81,0) 10(-1.27,0) 11(1.27,0) 12(3.81,0) 13(6.35,0) 14(8.89,0) 15(11.43,0) 16(13.97,0) 17(16.51,0) 18(19.05,0) 19(21.59,0) 20(24.13,0)
Top Overlay:
  lines w0.2: -22.86,-0.635 -22.225,-1.27 -20.955,-1.27 -20.32,-0.635 ; -22.86,0.635 -22.225,1.27 -20.955,1.27 -20.32,0.635 ; -20.32,-0.635 -20.32,0.635 ; -20.32,-0.635 -19.685,-1.27 -18.415,-1.27 -17.78,-0.635 ; -20.32,0.635 -19.685,1.27 -18.415,1.27 -17.78,0.635 ; -17.78,-0.635 -17.78,0.635 ; -17.78,-0.635 -17.145,-1.27 -15.875,-1.27 -15.24,-0.635 ; -17.78,0.635 -17.145,1.27 -15.875,1.27 -15.24,0.635 ; -15.24,-0.635 -15.24,0.635 ; -15.24,-0.635 -14.605,-1.27 -13.335,-1.27 -12.7,-0.635 ; -15.24,0.635 -14.605,1.27 -13.335,1.27 -12.7,0.635 ; -12.7,-0.635 -12.065,-1.27 -10.795,-1.27 -10.16,-0.635 ; -12.7,-0.635 -12.7,0.635 ; -12.7,0.635 -12.065,1.27 -10.795,1.27 -10.16,0.635 ; -10.16,-0.635 -10.16,0.635 ; -10.16,-0.635 -9.525,-1.27 -8.255,-1.27 -7.62,-0.635 ; -10.16,0.635 -9.525,1.27 -8.255,1.27 -7.62,0.635 ; -7.62,-0.635 -6.985,-1.27 -5.715,-1.27 -5.08,-0.635 ; -7.62,-0.635 -7.62,0.635 ; -7.62,0.635 -6.985,1.27 -5.715,1.27 -5.08,0.635 ; -5.08,-0.635 -4.445,-1.27 -3.175,-1.27 -2.54,-0.635 ; -5.08,-0.635 -5.08,0.635 ; -5.08,0.635 -4.445,1.27 -3.175,1.27 -2.54,0.635 ; -2.54,-0.635 -1.905,-1.27 -0.635,-1.27 0,-0.635 ; -2.54,-0.635 -2.54,0.635 ; -2.54,0.635 -1.905,1.27 -0.635,1.27 0,0.635 ; 0,-0.635 0,0.635 ; 0,-0.635 0.635,-1.27 1.905,-1.27 2.54,-0.635 ; 0,0.635 0.635,1.27 1.905,1.27 2.54,0.635 ; 2.54,-0.635 3.175,-1.27 4.445,-1.27 5.08,-0.635 ; 2.54,-0.635 2.54,0.635 ; 2.54,0.635 3.175,1.27 4.445,1.27 5.08,0.635 ; 5.08,-0.635 5.715,-1.27 6.985,-1.27 7.62,-0.635 ; 5.08,-0.635 5.08,0.635 ; 5.08,0.635 5.715,1.27 6.985,1.27 7.62,0.635 ; 7.62,-0.635 7.62,0.635 ; 7.62,-0.635 8.255,-1.27 9.525,-1.27 10.16,-0.635 ; 7.62,0.635 8.255,1.27 9.525,1.27 10.16,0.635 ; 10.16,-0.635 10.795,-1.27 12.065,-1.27 12.7,-0.635 ; 10.16,-0.635 10.16,0.635 ; 10.16,0.635 10.795,1.27 12.065,1.27 12.7,0.635 ; 12.7,-0.635 12.7,0.635 ; 12.7,-0.635 13.335,-1.27 14.605,-1.27 15.24,-0.635 ; 12.7,0.635 13.335,1.27 14.605,1.27 15.24,0.635 ; 15.24,-0.635 15.875,-1.27 17.145,-1.27 17.78,-0.635 ; 15.24,-0.635 15.24,0.635 ; 15.24,0.635 15.875,1.27 17.145,1.27 17.78,0.635 ; 17.78,-0.635 18.415,-1.27 19.685,-1.27 20.32,-0.635 ; 17.78,-0.635 17.78,0.635 ; 17.78,0.635 18.415,1.27 19.685,1.27 20.32,0.635 ; 20.32,-0.635 20.32,0.635 ; 20.32,-0.635 20.955,-1.27 22.225,-1.27 22.86,-0.635 ; 20.32,0.635 20.955,1.27 22.225,1.27 22.86,0.635 ; 22.86,-0.635 23.495,-1.27 24.765,-1.27 25.4,-0.635 25.4,0.635 24.765,1.27 23.495,1.27 22.86,0.635 ; 22.86,-0.635 22.86,0.635 ; -25.4,-1.27 -25.4,1.27 -22.86,1.27 -22.86,-1.27 -25.4,-1.27
Top Assy:
  lines w0.1: -22.86,-0.635 -22.225,-1.27 -20.955,-1.27 -20.32,-0.635 ; -22.86,0.635 -22.225,1.27 -20.955,1.27 -20.32,0.635 ; -20.32,-0.635 -19.685,-1.27 -18.415,-1.27 -17.78,-0.635 ; -20.32,-0.635 -20.32,0.635 ; -20.32,0.635 -19.685,1.27 -18.415,1.27 -17.78,0.635 ; -17.78,-0.635 -17.145,-1.27 -15.875,-1.27 -15.24,-0.635 ; -17.78,-0.635 -17.78,0.635 ; -17.78,0.635 -17.145,1.27 -15.875,1.27 -15.24,0.635 ; -15.24,-0.635 -14.605,-1.27 -13.335,-1.27 -12.7,-0.635 ; -15.24,-0.635 -15.24,0.635 ; -15.24,0.635 -14.605,1.27 -13.335,1.27 -12.7,0.635 ; -12.7,-0.635 -12.7,0.635 ; -12.7,-0.635 -12.065,-1.27 -10.795,-1.27 -10.16,-0.635 ; -12.7,0.635 -12.065,1.27 -10.795,1.27 -10.16,0.635 ; -10.16,-0.635 -9.525,-1.27 -8.255,-1.27 -7.62,-0.635 ; -10.16,-0.635 -10.16,0.635 ; -10.16,0.635 -9.525,1.27 -8.255,1.27 -7.62,0.635 ; -7.62,-0.635 -7.62,0.635 ; -7.62,-0.635 -6.985,-1.27 -5.715,-1.27 -5.08,-0.635 ; -7.62,0.635 -6.985,1.27 -5.715,1.27 -5.08,0.635 ; -5.08,-0.635 -5.08,0.635 ; -5.08,-0.635 -4.445,-1.27 -3.175,-1.27 -2.54,-0.635 ; -5.08,0.635 -4.445,1.27 -3.175,1.27 -2.54,0.635 ; -2.54,-0.635 -2.54,0.635 ; -2.54,-0.635 -1.905,-1.27 -0.635,-1.27 0,-0.635 ; -2.54,0.635 -1.905,1.27 -0.635,1.27 0,0.635 ; 0,-0.635 0.635,-1.27 1.905,-1.27 2.54,-0.635 ; 0,-0.635 0,0.635 ; 0,0.635 0.635,1.27 1.905,1.27 2.54,0.635 ; 2.54,-0.635 3.175,-1.27 4.445,-1.27 5.08,-0.635 ; 2.54,-0.635 2.54,0.635 ; 2.54,0.635 3.175,1.27 4.445,1.27 5.08,0.635 ; 5.08,-0.635 5.08,0.635 ; 5.08,-0.635 5.715,-1.27 6.985,-1.27 7.62,-0.635 ; 5.08,0.635 5.715,1.27 6.985,1.27 7.62,0.635 ; 7.62,-0.635 7.62,0.635 ; 7.62,-0.635 8.255,-1.27 9.525,-1.27 10.16,-0.635 ; 7.62,0.635 8.255,1.27 9.525,1.27 10.16,0.635 ; 10.16,-0.635 10.16,0.635 ; 10.16,-0.635 10.795,-1.27 12.065,-1.27 12.7,-0.635 ; 10.16,0.635 10.795,1.27 12.065,1.27 12.7,0.635 ; 12.7,-0.635 12.7,0.635 ; 12.7,-0.635 13.335,-1.27 14.605,-1.27 15.24,-0.635 ; 12.7,0.635 13.335,1.27 14.605,1.27 15.24,0.635 ; 15.24,-0.635 15.875,-1.27 17.145,-1.27 17.78,-0.635 ; 15.24,-0.635 15.24,0.635 ; 15.24,0.635 15.875,1.27 17.145,1.27 17.78,0.635 ; 17.78,-0.635 18.415,-1.27 19.685,-1.27 20.32,-0.635 ; 17.78,-0.635 17.78,0.635 ; 17.78,0.635 18.415,1.27 19.685,1.27 20.32,0.635 ; 20.32,-0.635 20.955,-1.27 22.225,-1.27 22.86,-0.635 ; 20.32,-0.635 20.32,0.635 ; 20.32,0.635 20.955,1.27 22.225,1.27 22.86,0.635 ; 22.86,-0.635 23.495,-1.27 24.765,-1.27 25.4,-0.635 25.4,0.635 24.765,1.27 23.495,1.27 22.86,0.635 ; 22.86,-0.635 22.86,0.635 ; -25.4,-1.27 -22.86,-1.27 -22.86,1.27 -25.4,1.27 -25.4,-1.27
Size Area:
  lines w0.05: 25.4,-1.27 25.4,1.27 ; 25.4,-1.27 25.4,1.27 ; 25.4,-1.27 -25.4,-1.27 -25.4,1.27 25.4,1.27
  lines w0.1: -0.5,0 0.5,0 ; 0,-0.5 0,0.5
3D body "PLS-20.STEP": height 8.54, standoff -3, extent -25.4,-1.27 25.4,1.27

## CON: PLS-30R [mm]
pads (31):
  oct 1.8x1.8 hole 1: 1(0,0)
  round 1.8 hole 1: 2(2.54,0) 3(5.08,0) 4(7.62,0) 5(10.16,0) 6(12.7,0) 7(15.24,0) 8(17.78,0) 9(20.32,0) 10(22.86,0) 11(25.4,0) 12(27.94,0) 13(30.48,0) 14(33.02,0) 15(35.56,0) 16(38.1,0) 17(40.64,0) 18(43.18,0) 19(45.72,0) 20(48.26,0) 21(50.8,0) 22(53.34,0) 23(55.88,0) 24(58.42,0) 25(60.96,0) 26(63.5,0) 27(66.04,0) 28(68.58,0) 29(71.12,0) 30(73.66,0)
  round 0.5 on Mech1: ""(-0.875,-0.875)
Top Overlay:
  region: -1.27,-0.48 -0.48,-1.27 -1.27,-1.27
  lines w0.2: -1.27,-1.27 74.93,-1.27 74.93,1.27 -1.27,1.27 -1.27,-1.27
Top Assy:
  lines w0.1: -1.27,-1.27 74.93,-1.27 74.93,1.27 -1.27,1.27 -1.27,-1.27
Size Area:
  lines w0.1: -1.27,-1.27 74.93,-1.27 74.93,1.27 -1.27,1.27 -1.27,-1.27
3D body "PLS30-90.STEP": height 5.49, standoff -2.96, extent -1.27,-7.35 74.93,1.27

## CON: RJ45 MJ5688-B111-HR1-C [mm]
pads (12):
  rect 0.65x3.05 smd: 1(3.497,7.135) 2(2.477,7.135) 3(1.457,7.135) 4(0.437,7.135) 5(-0.583,7.135) 6(-1.603,7.135) 7(-2.623,7.135) 8(-3.643,7.135)
  rect 2.5x3.89 smd: 9(-8.733,-2.845) 10(8.587,-2.845)
  round 3.3 hole 3.3 unplated: ""(-6.423,-2.845) ""(6.277,-2.845)
Top Overlay:
  lines w0.254: -8.348,-5.021 -8.348,-8.245 8.202,-8.245 8.202,-5.021 ; -8.348,-0.669 -8.348,7.569 -4.199,7.569 ; 4.053,7.569 8.202,7.569 8.202,-0.669
Size Area:
  lines w0.003: -0.073,0.646 -0.073,0.646
3D body "ACC-M-RJCSE-5380-01-REVT1.step": height 14.72, standoff -1.32, extent -9.503,-8.096 9.357,8.438